# EAGLE library part FH12-10S-0.5SH(55) (library FH12-10S-0.5SH_55_)
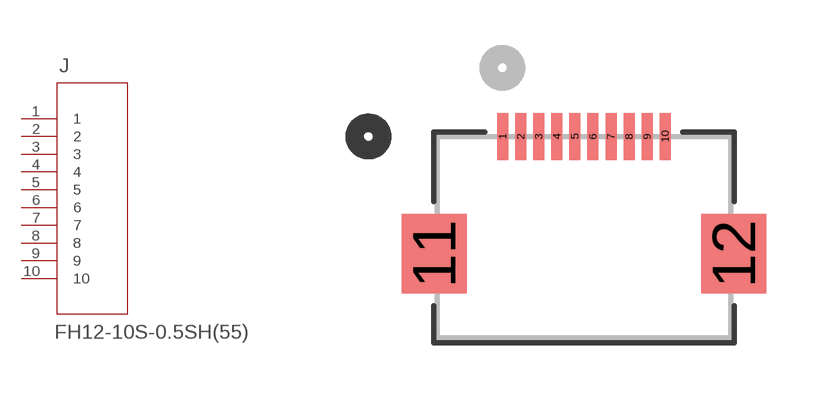
[diagram p0: symbol with the pads of FH12-10S-0.5SH(55)_HIR; footprint FH12-10S-0.5SH(55)_HIR]

Designator prefix J

## FH12-10S-0.5SH(55) (BUILT_BY: EMA_Colton; COPYRIGHT: Copyright (C) 2018 Accelerated Designs. All rights reserved; DATASHEET_URL: https://snapeda.s3.us-east-1.amazonaws.com/datasheet/FH12-10S-0.5SH(55).pdf; DESCRIPTION: 10 Position FFC, FPC Connector Contacts, Bottom 0.020" (0.50mm) Surface Mount, Right Angle; MANUFACTURER: Hirose Electric; MPN: FH12-10S-0.5SH(55); SOURCELIBRARY: Hirose_2020-02-14; SOURCE_URL: https://www.snapeda.com/parts/FH12-10S-0.5SH(55)/Hirose/view-part/; VENDOR: Hirose)  [FH12-10S-0.5SH(55)_HIR]
1  1  pas
2  2  pas
3  3  pas
4  4  pas
5  5  pas
6  6  pas
7  7  pas
8  8  pas
9  9  pas
10  10  pas

## Footprint FH12-10S-0.5SH(55)_HIR (pad centres in mm)
smd 0.305 x 1.295: 1 -2.25,2.794; 2 -1.75,2.794; 3 -1.25,2.794; 4 -0.75,2.794; 5 -0.25,2.794; 6 0.25,2.794; 7 0.75,2.794; 8 1.25,2.794; 9 1.75,2.794; 10 2.25,2.794
smd 1.803 x 2.21: 11 -4.15,-0.456; 12 4.15,-0.456